# Altium schematic symbol library Gateway_Academic.SchLib: 77 symbols (part 1 of 2)
Pins are listed as number, name and electrical type; pins without a type are passive.

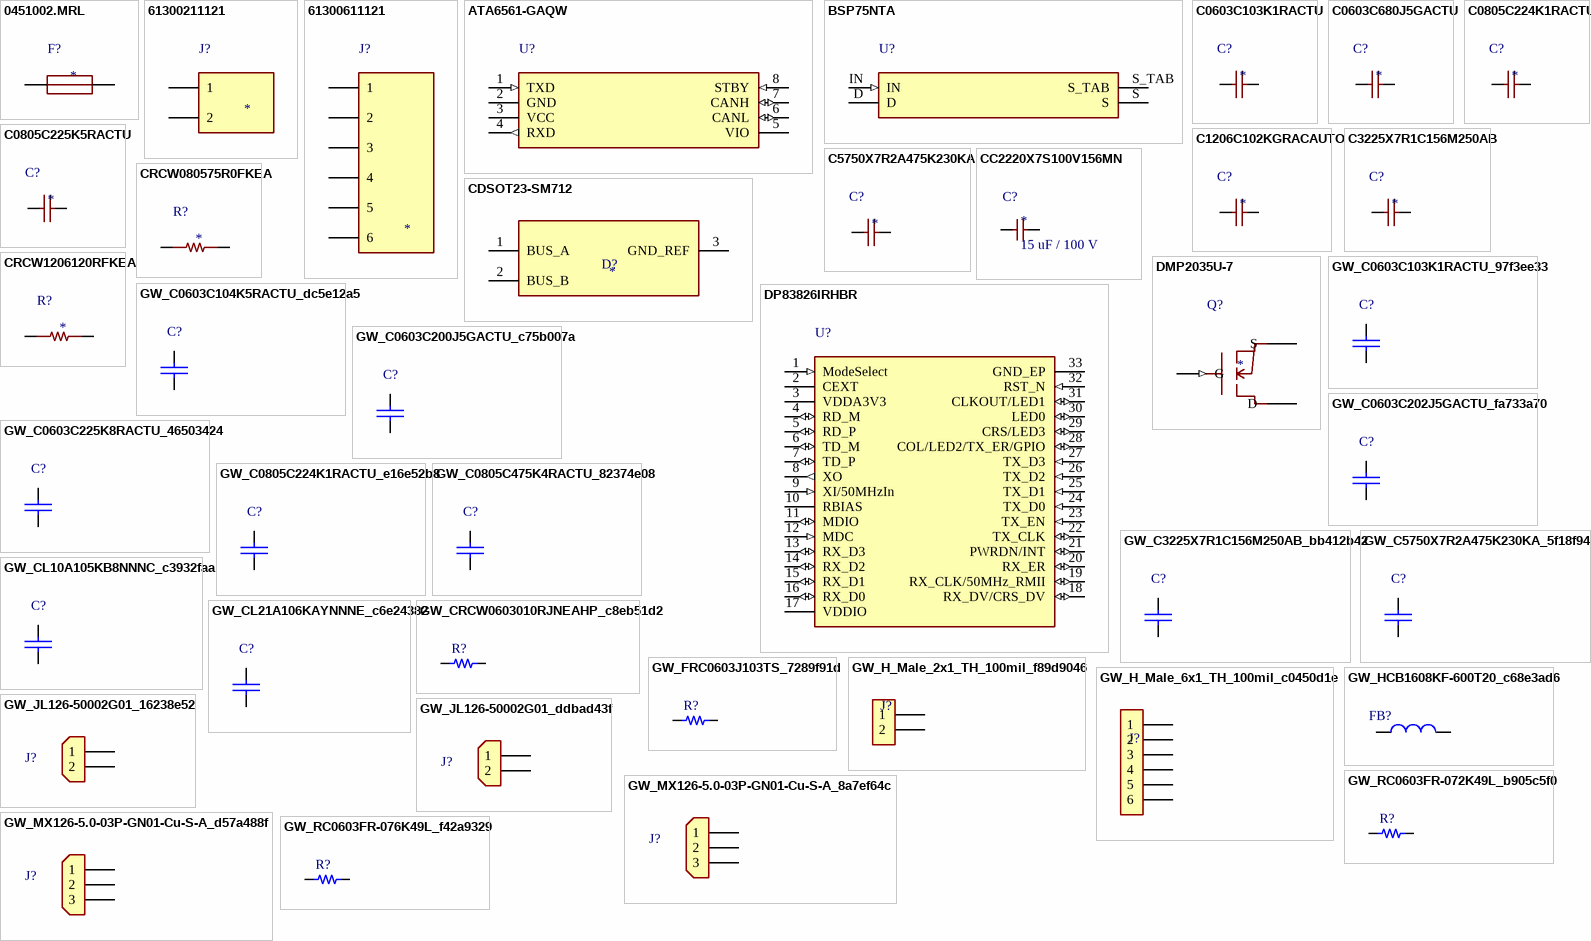
[diagram p0: symbols 0451002.MRL to GW_RC0603FR-076K49L_f42a9329]

## 0451002.MRL
designator F?
User-approved2A125VDC fuse; manufacturer dimensioned native footprint linked. Nonpolar terminals project1/2; supervised current-limited lab source. Not electrically tested.; Manufacturer: Littelfuse; Manufacturer Part Number: 0451002.MRL; CAD Status: CAD_VERIFIED; Electrical Approval: PROTOTYPE_APPROVED; Electrical Test: NOT_TESTED; Source: Official451/453 series Rev01-Dec-2025 pp1-4; electrical row002 and ordering; Datasheet: https://www.littelfuse.com/assetdocs/fuse-451-and-453-datasheet?assetguid=533cd5cc-956c-4243-867f-6ab5a62f6ba1; Limitations: User-approved2A125VDC fuse; manufacturer dimensioned native footprint linked. Nonpolar terminals project1/2; supervised current-limited lab source. Not electrically tested.; Design Approval: PROTOTYPE_APPROVED
footprint GW_0451_LITTELFUSE
pins: 1 END1, 2 END2

## 61300211121
designator J?
Wurth 61300211121 official datasheet p1 dimensions/recommended hole pattern;1.10mm holes2.54pitch;project orientationpin1lefttopview,sequence+X; Manufacturer: Wurth Elektronik; Value: 2x1 2.54mm straight male header; CAD Status: CAD_VERIFIED_GEOMETRY;NATIVE_PLACEMENT_PENDING; Electrical Status: DERIVED_PENDING_REVIEW; Manufacturer Part Number: 61300211121; Source: Wurth 61300211121 official datasheet p1 dimensions/recommended hole pattern;1.10mm holes2.54pitch; Datasheet URL: https://www.we-online.com/components/products/datasheet/61300211121.pdf
footprint GW_WRPHD_2X1_254_WURTH
pins: 1, 2

## 61300611121
designator J?
Wurth 61300611121 official datasheet p1 dimensions/recommended hole pattern;1.10mm holes2.54pitch;project orientationpin1lefttopview,sequence+X; Manufacturer: Wurth Elektronik; Value: 6x1 2.54mm straight male header; CAD Status: CAD_VERIFIED_GEOMETRY;NATIVE_PLACEMENT_PENDING; Electrical Status: DERIVED_PENDING_REVIEW; Manufacturer Part Number: 61300611121; Source: Wurth 61300611121 official datasheet p1 dimensions/recommended hole pattern;1.10mm holes2.54pitch; Datasheet URL: https://www.we-online.com/components/products/datasheet/61300611121.pdf
footprint GW_WRPHD_6X1_254_WURTH
pins: 1, 2, 3, 4, 5, 6

## ATA6561-GAQW
designator U?  (value not drawn)
ATA6561-GAQW; CAD_VERIFIED_GEOMETRY; ExactselectedSOIC8,notVDFN,verifiedagainstMicrochiprecommendedlands. NoEP9. SharedTIfoot hasidenticalpadgeometry;smallroundedcornersareprototypeprocesschoice. NativeECO/assemblyreviewpending.; CAD_Status: CAD_VERIFIED_GEOMETRY;NATIVE_ECO_PENDING; Electrical_Status: PROVISIONAL; CAD_Source: Microchip DS20005991B p19 C04-2057-OARevE recommendedlands:C5.40,E1.27,X.60,Y1.55; Manufacturer: Microchip; Manufacturer Part Number: ATA6561-GAQW; Value: ATA6561-GAQW; CAD_Limitations: ExactselectedSOIC8,notVDFN,verifiedagainstMicrochiprecommendedlands. NoEP9. SharedTIfoot hasidenticalpadgeometry;smallroundedcornersareprototypeprocesschoice. NativeECO/assemblyreviewpending.
footprint GW_SOIC8_1P27_5P4
pins: 1 TXD (in), 2 GND (power), 3 VCC (power), 4 RXD (out), 5 VIO (power), 6 CANL (io), 7 CANH (io), 8 STBY (in)

## BSP75NTA
designator U?  (value not drawn)
BSP75NTA smart low-side switch; physical terminal positions and Diodes land pattern verified; IN,D,S,S_TAB identifiers; driver VOH acceptance remains pending.; Manufacturer: Diodes Incorporated; CAD_Status: CAD_BLOCKED; Electrical_Status: PROVISIONAL; CAD_Source: Diodes DS33016 Rev7-2 pp1,8; terminal numbering absent; CAD_Limitations: CAD_BLOCKED: terminal identifiers are role names, not manufacturer numbers. Tab=Source, isolated from Drain. Need exact numbered Type DN drawing/model before any placement or footprint binding.; CAD Status: CAD_VERIFIED; Limitations: Physical mapping verified from Diodes top view: with tab above, left IN, middle D, right S; tab S_TAB=Source. No manufacturer numeric pin IDs asserted. Loaded driver VOH and startup OFF not yet verified.; Electrical Approval: ELECTRICAL_BLOCKED_DRIVER_VOLTAGE_PENDING; Physical Mapping: IN left lower;D center lower;S right lower;S_TAB upper tab;Top View; Manufacturer Part Number: BSP75NTA; Value: BSP75NTA; Source: Diodes DS33016 Rev7-2 Jan2024 p1 Top View Pin Out, p8 Suggested Pad Layout; functional pad identifiers preserve original symbol pins; Datasheet: sources/bsp75n_closure/BSP75N.pdf
footprint GW_BSP75N_SOT223_DN_DIODES
pins: D, IN (in), S (power), S_TAB (power)

## C0603C103K1RACTU
designator C?
10nF10%100VX7R; Exact KEMET DI_CIN spec; KEMET C1027Table3 nominal1608 mechanically compatible reference lands; Manufacturer Part Number: C0603C103K1RACTU; Design Approval: PROPOSED_APPLICATION_VALUE; CAD Status: CAD_VERIFIED; Electrical Test: NOT_TESTED; Manufacturer: KEMET; Value: 10nF10%100VX7R; Source: Exact KEMET DI_CIN spec; KEMET C1027Table3 nominal1608 mechanically compatible reference lands; Datasheet: sources/DI_CIN_C0603C103K1RACTU.pdf
footprint GW_0603_KEMET_NOMINAL
pins: 1, 2

## C0603C680J5GACTU
designator C?
KEMET C0603C680J5GACTU exact manufacturer spec; shared1608 body; KEMET C1027Table3p12 nominal1608 lands; 68pF5%50VC0G; DNP in frozen BOM; dvdt open. Fit only if startup review/measurement requires slower ramp.; Design Approval: PROTOTYPE_APPROVED; Electrical Test: NOT_TESTED; CAD Status: CAD_VERIFIED; Manufacturer: KEMET; Manufacturer Part Number: C0603C680J5GACTU; Value: 68pF5%50VC0G; Source: KEMET C0603C680J5GACTU exact manufacturer spec; shared1608 body; KEMET C1027Table3p12 nominal1608 lands; Limitations: DNP in frozen BOM; dvdt open. Fit only if startup review/measurement requires slower ramp.
footprint GW_0603_KEMET_NOMINAL
pins: 1, 2

## C0805C224K1RACTU
designator C?
KEMET exact0805 spec body/termination dimensions; KEMET C1027 p12 Table3 nominal2012 reflow lands transferred to mechanically matching commercial0805; 220nF10%100VX7R;; Manufacturer Part Number: C0805C224K1RACTU; Design Approval: PROTOTYPE_APPROVED; Electrical Test: NOT_TESTED; CAD Status: CAD_VERIFIED; Limitations: None; Manufacturer: KEMET; Value: 220nF10%100VX7R; Source: KEMET exact0805 spec body/termination dimensions; KEMET C1027 p12 Table3 nominal2012 reflow lands transferred to mechanically matching commercial0805
footprint GW_0805_KEMET_NOMINAL
pins: 1, 2

## C0805C225K5RACTU
designator C?
KEMET exact0805 spec body/termination dimensions; KEMET C1027 p12 Table3 nominal2012 reflow lands transferred to mechanically matching commercial0805; 2.2uF10%50VX7R; VCC5V local bypass;2.2uF prototype selection replaces known insufficient1uF part. Assumed>=60% bias retention; verify stableVCC at bring-up.; Manufacturer Part Number: C0805C225K5RACTU; Design Approval: PROTOTYPE_APPROVED; Electrical Test: NOT_TESTED; CAD Status: CAD_VERIFIED; Manufacturer: KEMET; Value: 2.2uF10%50VX7R; Source: KEMET exact0805 spec body/termination dimensions; KEMET C1027 p12 Table3 nominal2012 reflow lands transferred to mechanically matching commercial0805; Limitations: VCC5V local bypass;2.2uF prototype selection replaces known insufficient1uF part. Assumed>=60% bias retention; verify stableVCC at bring-up.
footprint GW_0805_KEMET_NOMINAL
pins: 1, 2

## C1206C102KGRACAUTO
designator C?
KEMET1nF10%2kVDCX7R1206; Ethernet chassis AC return; no safety-Y or surge claim; Manufacturer: KEMET; Manufacturer Part Number: C1206C102KGRACAUTO; Value: 1 nF; Tolerance: 10%; Voltage Rating: 2000 VDC; Dielectric: X7R; CAD Status: CAD_VERIFIED; Electrical Approval: PROVISIONAL_APPLICATION; not safety-Y certified; Electrical Test: NOT_TESTED; Assembly: JLC Extended observed2026-11-07; quantity unknown; no stock reservation; Package: 1206 /3216; Datasheet: sources/ethernet_1nf/C600002.pdf; Source: KEMET C1076_X7R_HV_AUTO_SMD9/10/2019 pp1-2 ordering/rating,p4 body,p10 Table3 densityB1206; C600002 exact catalog identity; LCSC Part Number: C600002; Terminal Mapping: Nonpolar, project1-left/2-right; symbol1->pad1,2->pad2
footprint GW_C1206_KEMET_C1076_DENSITY_B
pins: 1, 2

## C3225X7R1C156M250AB
designator C?
TDK official C3225X7R1C156M250AB product page lands PA2.0-2.4 PB1.0-1.2 PC1.9-2.5; TI table10-1 rated45uF example; 15uF20%16VX7R; 3 per buck:45uF rated per TI1MHz example. Prototype load-step/ripple confirmation pending; do not connect to24V input.; Design Approval: PROTOTYPE_APPROVED; Electrical Test: NOT_TESTED; CAD Status: CAD_VERIFIED; Manufacturer: TDK; Manufacturer Part Number: C3225X7R1C156M250AB; Value: 15uF20%16VX7R; Source: TDK official C3225X7R1C156M250AB product page lands PA2.0-2.4 PB1.0-1.2 PC1.9-2.5; TI table10-1 rated45uF example; Limitations: 3 per buck:45uF rated per TI1MHz example. Prototype load-step/ripple confirmation pending; do not connect to24V input.
footprint GW_C3225_TDK_REFLOW
pins: 1, 2

## C5750X7R2A475K230KA
designator C?
TDK C5750X7R2A475K230KA exact2014web-derived PDF p1 lands,p2 DCbias; current official product page same PA/PB/PC; 4.7uF10%100VX7R;; Design Approval: PROTOTYPE_APPROVED; Electrical Test: NOT_TESTED; CAD Status: CAD_VERIFIED; Limitations: None; Manufacturer: TDK; Manufacturer Part Number: C5750X7R2A475K230KA; Value: 4.7uF10%100VX7R; Source: TDK C5750X7R2A475K230KA exact2014web-derived PDF p1 lands,p2 DCbias; current official product page same PA/PB/PC
footprint GW_C5750_TDK_REFLOW
pins: 1, 2

## CC2220X7S100V156MN
designator C?  value 15 uF / 100 V
TORCH15uF100V2220 MLCC; C54157533 catalog identity; family PDF does not explicitly cover X7S. Footprint pending exact manufacturer lands.; Manufacturer: TORCH; Manufacturer Part Number: CC2220X7S100V156MN; Tolerance: 20% (M ordering code); Voltage Rating: 100 V; Dielectric: X7S per MPN; not explicitly covered in supplied family PDF; CAD Status: SYMBOL_READY;FOOTPRINT_MISSING; Electrical Status: PROVISIONAL;NOT_SELECTED_AS_BOM_REPLACEMENT; Limitations: Family PDF p1 codes156/M/100V and2220body; X7S exact specifications, DCbias/effective capacitance and manufacturer lands unverified. No application approval.; Package: 2220; LCSC: C54157533; Datasheet: sources/cap15uf100v/C54157533.pdf; Catalog URL: https://www.lcsc.com/product-detail/C54157533.html
pins: 1, 2

## CDSOT23-SM712
designator D?
Bourns CDSOT23-SM712 saved2026-11-07 pp1-2 pin diagram and Recommended Footprint; CAD mapping supported; no transferred 1kV surge rating for THVD1420. Populate only after protection qualification.; CAD Status: CAD_CANDIDATE; Manufacturer: Bourns; Manufacturer Part Number: CDSOT23-SM712; Source: Bourns CDSOT23-SM712 saved2026-11-07 pp1-2 pin diagram and Recommended Footprint; Limitations: CAD mapping supported; no transferred 1kV surge rating for THVD1420. Populate only after protection qualification.
footprint GW_SM712_BOURNS
pins: 1 BUS_A, 2 BUS_B, 3 GND_REF

## CRCW080575R0FKEA
designator R?
75Ohm1%0.125W0805 Vishay D/CRCW e3; Ethernet cable termination; not C-suffix commodity variant; Manufacturer Part Number: CRCW080575R0FKEA; Value: 75 Ohm; Tolerance: 1%; Power Rating: 0.125 W at70C; derating applies; TCR: 100 ppm/K; Local Datasheet: sources/ethernet_75ohm/C844859.pdf; CAD Status: CAD_VERIFIED; Design Approval: RETAINED_ORIGINAL_SELECTION; Electrical Test: NOT_TESTED; Assembly: JLC Extended observed; quantity unknown; verify before ordering; Manufacturer: Vishay; Package: 0805 /2012; Datasheet: https://www.vishay.com/docs/20035/dcrcwe3.pdf; Source: Vishay20035 Rev18-Jun-2018 p3 ordering, p9 body/reflow lands; JLC C844859 exact identity observed2026-11-07; LCSC Part Number: C844859; Terminal Mapping: Nonpolar resistor: project pin1=left pad1,pin2=right pad2
footprint GW_CRCW0805_VISHAY_20035_REFLOW
pins: 1, 2

## CRCW1206120RFKEA
designator R?
Vishay D/CRCW e3 family20035;120ohm1%0.25W1206; optional bus-end termination,open-default jumper.; Manufacturer Part Number: CRCW1206120RFKEA; Value: 120 Ohm; CAD Status: CAD_VERIFIED_GEOMETRY;NATIVE_PLACEMENT_PENDING; Electrical Status: DERIVED_PENDING_REVIEW;END_NODE_ONLY;STOCK_UNVERIFIED; Tolerance: 1%; Power Rating: 0.25W at70C; Manufacturer: Vishay; Source: Vishay20035 family ordering/power;18Jun2018p9 REFLOW1206 lands; Package: 1206; Datasheet: sources/ethernet_75ohm/C844859.pdf
footprint GW_CRCW1206_VISHAY_20035_REFLOW
pins: 1, 2

## DMP2035U-7
designator Q?
Diodes DS31830 Rev11-2 June2025 p1 top view/order,p2 electrical,p6 suggested lands; conventional PMOS symbol; used in5V BSP input driver,NOT24V load path; Manufacturer: Diodes Incorporated; Manufacturer Part Number: DMP2035U-7; Value: PMOS20V;VGS±10V; CAD Status: CAD_VERIFIED_GEOMETRY;NATIVE_PLACEMENT_PENDING; Electrical Status: DERIVED_PENDING_REVIEW; Source: Diodes DS31830 Rev11-2 June2025 p1 top view/order,p2 electrical,p6 suggested lands; Datasheet: sources/autonomous_closure/DMP2035U.pdf; Terminal Mapping: Top view tab/lead above C/D; lower-left B/G; lower-right E/S; manufacturer functional IDs, no guessed numbers
footprint GW_DMP2035U_GSD_DIODES
pins: D, G (in), S

## DP83826IRHBR
designator U?  (value not drawn)
DP83826IRHBR; CAD_VERIFIED_GEOMETRY; Manufacturer lands/pin33map verified;R0.05 usesAltium40% ofhalf0.25mm. Fourrectangularpastewindows approximate80percent,laser-corner/process review required. NativeinstanceECO notverified;optionalvias needplugging/tenting/fill treatment.; Manufacturer: Texas Instruments; CAD_Status: CAD_VERIFIED_GEOMETRY;NATIVE_ECO_PENDING; Electrical_Status: PROVISIONAL; CAD_Source: TI SNLS647I RHB0032M4223725/A PDF112-113;32lead.6x.25,pitch.5,row4.8,EP33=2.1square,4x.94paste windows; Manufacturer Part Number: DP83826IRHBR; Value: DP83826IRHBR; CAD_Limitations: Manufacturer lands/pin33map verified;R0.05 usesAltium40% ofhalf0.25mm. Fourrectangularpastewindows approximate80percent,laser-corner/process review required. NativeinstanceECO notverified;optionalvias needplugging/tenting/fill treatment.
footprint GW_RHB0032M_TI
pins: 1 ModeSelect (in), 2 CEXT, 3 VDDA3V3 (power), 4 RD_M (io), 5 RD_P (io), 6 TD_M (io), 7 TD_P (io), 8 XO (out), 9 XI/50MHzIn (in), 10 RBIAS, 11 MDIO (io), 12 MDC (in), 13 RX_D3 (io), 14 RX_D2 (io), 15 RX_D1 (io), 16 RX_D0 (io), 17 VDDIO (power), 18 RX_DV/CRS_DV (io), 19 RX_CLK/50MHz_RMII (io), 20 RX_ER (io), 21 PWRDN/INT (io), 22 TX_CLK (io), 23 TX_EN (in), 24 TX_D0 (in), 25 TX_D1 (in), 26 TX_D2 (in), 27 TX_D3 (in), 28 COL/LED2/TX_ER/GPIO (io), 29 CRS/LED3 (io), 30 LED0 (io), 31 CLKOUT/LED1 (io), 32 RST_N (in), 33 GND_EP (power)

## GW_C0603C103K1RACTU_97f3ee33
designator C?, comment 10 nF  (value not drawn)
C0603C103K1RACTU; 10 nF; 100 V; X7R; -55..125 C; CAD_CANDIDATE; Manufacturer: KEMET; Tolerance: 10%; CAD_Status: CAD_VERIFIED_SOURCE_LAND;NATIVE_INSTANCE_ECO_PENDING; Electrical_Status: PROVISIONAL; CAD_Source: Professor_shared.SchLib glyph Cap_0.1uF_0603_50V; CAD_Limitations: Same-manufacturer series mounting geometry verified; prototype mask/paste choices recorded. Electrical application limits unchanged. Native instance links/ECO pending.; Electrical_Notes: Ficha KEMET local DI_CIN p1; no confundir con externo CL10B103KA8WPNC 25 V. Modelo candidato existente; sin cotejo visual de pads/pines en Altium.; Manufacturer Part Number: C0603C103K1RACTU; Value: 10 nF; Rating: 100 V; X7R; -55..125 C; Power Rating: N/A; Package: 0603
footprint GW_0603_KEMET_NOMINAL
pins: 1, 2

## GW_C0603C104K5RACTU_dc5e12a5
designator C?, comment 100 nF  (value not drawn)
C0603C104K5RACTU; 100 nF; 50 V; X7R; -55..125 C; CAD_CANDIDATE; Manufacturer: KEMET; Tolerance: 10%; CAD_Status: CAD_VERIFIED_SOURCE_LAND;NATIVE_INSTANCE_ECO_PENDING; Electrical_Status: PROVISIONAL; CAD_Source: Professor_shared.SchLib glyph Cap_0.1uF_0603_50V; CAD_Limitations: Same-manufacturer series mounting geometry verified; prototype mask/paste choices recorded. Electrical application limits unchanged. Native instance links/ECO pending.; Electrical_Notes: Ficha KEMET local p1. Adaptar parametros; no usar el Y5V 0603F104Z500CT como equivalente. Modelo candidato existente; sin cotejo visual de pads/pines en Altium.; Manufacturer Part Number: C0603C104K5RACTU; Value: 100 nF; Rating: 50 V; X7R; -55..125 C; Power Rating: N/A; Package: 0603
footprint GW_0603_KEMET_NOMINAL
pins: 1, 2

## GW_C0603C200J5GACTU_c75b007a
designator C?, comment 20 pF  (value not drawn)
C0603C200J5GACTU; 20 pF; 50 V; C0G; CAD_CANDIDATE; Manufacturer: KEMET; Tolerance: 5%; CAD_Status: CAD_VERIFIED_SOURCE_LAND;NATIVE_INSTANCE_ECO_PENDING; Electrical_Status: PROVISIONAL; CAD_Source: Professor_shared.SchLib glyph Cap_0.1uF_0603_50V; CAD_Limitations: Same-manufacturer series mounting geometry verified; prototype mask/paste choices recorded. Electrical application limits unchanged. Native instance links/ECO pending.; Electrical_Notes: Valor guia fabricante; validar lazo. Con RFBT100k no obligatorio universal; reservar DNP hasta respuesta/Bode. Modelo candidato existente; sin cotejo visual de pads/pines en Altium.; Manufacturer Part Number: C0603C200J5GACTU; Value: 20 pF; Rating: 50 V; C0G; Power Rating: N/A; Package: 0603
footprint GW_0603_KEMET_NOMINAL
pins: 1, 2

## GW_C0603C202J5GACTU_fa733a70
designator C?, comment 2 nF  (value not drawn)
C0603C202J5GACTU; 2 nF; 50 V; C0G; CAD_CANDIDATE; Manufacturer: KEMET; Tolerance: 5% seleccion; CAD_Status: CAD_VERIFIED_SOURCE_LAND;NATIVE_INSTANCE_ECO_PENDING; Electrical_Status: PROVISIONAL; CAD_Source: Professor_shared.SchLib glyph Cap_0.1uF_0603_50V; CAD_Limitations: Same-manufacturer series mounting geometry verified; prototype mask/paste choices recorded. Electrical application limits unchanged. Native instance links/ECO pending.; Electrical_Notes: Conflicto EVM C57=100 nF; prevalece requisito actual 2 nF, no copiar C57. Modelo candidato existente; sin cotejo visual de pads/pines en Altium.; Manufacturer Part Number: C0603C202J5GACTU; Value: 2 nF; Rating: 50 V; C0G; Power Rating: N/A; Package: 0603
footprint GW_0603_KEMET_NOMINAL
pins: 1, 2

## GW_C0603C225K8RACTU_46503424
designator C?, comment 2.2 uF  (value not drawn)
C0603C225K8RACTU; 2.2 uF; 10 V; X7R; ESR <100 mOhm; CAD_CANDIDATE; Manufacturer: KEMET; Tolerance: 10% candidato; ST permite 20%; CAD_Status: CAD_VERIFIED_SOURCE_LAND;NATIVE_INSTANCE_ECO_PENDING; Electrical_Status: PROVISIONAL; CAD_Source: Professor_shared.SchLib glyph Cap_0.1uF_0603_50V; CAD_Limitations: Same-manufacturer series mounting geometry verified; prototype mask/paste choices recorded. Electrical application limits unchanged. Native instance links/ECO pending.; Electrical_Notes: Falta ESR y capacitancia bajo VCORE/temperatura/envejecimiento. No conectar 3.3 V ni carga externa a VCAP. Modelo candidato existente; sin cotejo visual de pads/pines en Altium.; Manufacturer Part Number: C0603C225K8RACTU; Value: 2.2 uF; Rating: 10 V; X7R; ESR <100 mOhm; Power Rating: N/A; Package: 0603
footprint GW_0603_KEMET_NOMINAL
pins: 1, 2

## GW_C0805C224K1RACTU_e16e52b8
designator C?, comment 220 nF  (value not drawn)
C0805C224K1RACTU; 220 nF; 100 V; X7R; CAD_CANDIDATE; Manufacturer: KEMET; Tolerance: 10%; CAD_Status: CAD_VERIFIED_SOURCE_LAND;NATIVE_INSTANCE_ECO_PENDING; Electrical_Status: PROVISIONAL; CAD_Source: Professor_shared.SchLib glyph Cap_10uF_0805_25V_; CAD_Limitations: Same-manufacturer series mounting geometry verified; prototype mask/paste choices recorded. Electrical application limits unchanged. Native instance links/ECO pending.; Electrical_Notes: Uno por par VIN-PGND en lados opuestos; falta Ceff y cotejo dimensiones pads. Modelo candidato existente; sin cotejo visual de pads/pines en Altium.; Manufacturer Part Number: C0805C224K1RACTU; Value: 220 nF; Rating: 100 V; X7R; Power Rating: N/A; Package: 0805
footprint GW_0805_KEMET_NOMINAL
pins: 1, 2

## GW_C0805C475K4RACTU_82374e08
designator C?, comment 4.7 uF  (value not drawn)
C0805C475K4RACTU; 4.7 uF; 16 V; X7R; CAD_CANDIDATE; Manufacturer: KEMET; Tolerance: 10%; CAD_Status: CAD_VERIFIED_SOURCE_LAND;NATIVE_INSTANCE_ECO_PENDING; Electrical_Status: PROVISIONAL; CAD_Source: Professor_shared.SchLib glyph Cap_10uF_0805_25V_; CAD_Limitations: Same-manufacturer series mounting geometry verified; prototype mask/paste choices recorded. Electrical application limits unchanged. Native instance links/ECO pending.; Electrical_Notes: Ceff a 3.3 V pendiente; no sustituir por 10 uF solo por disponibilidad. Modelo candidato existente; sin cotejo visual de pads/pines en Altium.; Manufacturer Part Number: C0805C475K4RACTU; Value: 4.7 uF; Rating: 16 V; X7R; Power Rating: N/A; Package: 0805
footprint GW_0805_KEMET_NOMINAL
pins: 1, 2

## GW_C3225X7R1C156M250AB_bb412b42
designator C?, comment 15 uF por unidad; 45 uF nominal banco  (value not drawn)
C3225X7R1C156M250AB; 15 uF por unidad; 45 uF nominal banco; 16 V; X7R; CAD_CANDIDATE; Manufacturer: TDK; Tolerance: 20%; CAD_Status: CAD_VERIFIED_SOURCE_LAND;NATIVE_INSTANCE_ECO_PENDING; Electrical_Status: PROVISIONAL; CAD_Source: Professor_shared.SchLib glyph Cap_0.1uF_0603_50V; CAD_Limitations: Same-manufacturer series mounting geometry verified; prototype mask/paste choices recorded. Electrical application limits unchanged. Native instance links/ECO pending.; Electrical_Notes: Ceff a 3.3 V, ESR, escalon de carga y Bode pendientes. No atribuir 45 uF efectivos ni ESR3.04mOhm del modelo AR. Sin footprint1210 docente.; Manufacturer Part Number: C3225X7R1C156M250AB; Value: 15 uF por unidad; 45 uF nominal banco; Rating: 16 V; X7R; Power Rating: N/A; Package: 1210
footprint GW_C3225_TDK_REFLOW
pins: 1, 2

## GW_C5750X7R2A475K230KA_5f18f946
designator C?, comment 4.7 uF por unidad; Ceff total >=4.7 uF objetivo conservador  (value not drawn)
C5750X7R2A475K230KA; 4.7 uF por unidad; Ceff total >=4.7 uF objetivo conservador; 100 V; X7R; CAD_CANDIDATE; Manufacturer: TDK; Tolerance: 10%; CAD_Status: CAD_VERIFIED_SOURCE_LAND;NATIVE_INSTANCE_ECO_PENDING; Electrical_Status: PROVISIONAL; CAD_Source: Professor_shared.SchLib glyph Cap_0.1uF_0603_50V; CAD_Limitations: Same-manufacturer series mounting geometry verified; prototype mask/paste choices recorded. Electrical application limits unchanged. Native instance links/ECO pending.; Electrical_Notes: No fijar cantidad hasta curva bias a30 V+tolerancia+temperatura. 4.7 nominal no garantiza 4.7 efectivo. Carga RMS objetivo >= 0.35 A banco; 2220 no presente profesor.; Manufacturer Part Number: C5750X7R2A475K230KA; Value: 4.7 uF por unidad; Ceff total >=4.7 uF objetivo conservador; Rating: 100 V; X7R; Power Rating: N/A; Package: 2220
footprint GW_C5750_TDK_REFLOW
pins: 1, 2

## GW_CL10A105KB8NNNC_c3932faa
designator C?, comment 1 uF  (value not drawn)
CL10A105KB8NNNC; 1 uF; 50 V; X5R; -55..85 C; CAD_CANDIDATE; Manufacturer: Samsung Electro-Mechanics; Tolerance: 10%; CAD_Status: CAD_VERIFIED_SOURCE_LAND;NATIVE_INSTANCE_ECO_PENDING; Electrical_Status: PROVISIONAL; CAD_Source: Professor_shared.SchLib glyph Cap_1uF_0603_50V; CAD_Limitations: Same-manufacturer series mounting geometry verified; prototype mask/paste choices recorded. Electrical application limits unchanged. Native instance links/ECO pending.; Electrical_Notes: Samsung ficha oficial; Ceff/ESR pendientes por aplicacion. Limite X5R 85 C: no homologado para ambiente superior. Modelo candidato existente; sin cotejo visual de pads/pines en Altium.; Manufacturer Part Number: CL10A105KB8NNNC; Value: 1 uF; Rating: 50 V; X5R; -55..85 C; Power Rating: N/A; Package: 0603
footprint GW_SAMSUNG_CL10_1608_REFLOW
pins: 1, 2

## GW_CL21A106KAYNNNE_c6e24382
designator C?, comment 10 uF  (value not drawn)
CL21A106KAYNNNE; 10 uF; 25 V; X5R; -55..85 C; CAD_CANDIDATE; Manufacturer: Samsung Electro-Mechanics; Tolerance: 10%; CAD_Status: CAD_VERIFIED_SOURCE_LAND;NATIVE_INSTANCE_ECO_PENDING; Electrical_Status: PROVISIONAL; CAD_Source: Professor_shared.SchLib glyph Cap_10uF_0805_25V_; CAD_Limitations: Same-manufacturer series mounting geometry verified; prototype mask/paste choices recorded. Electrical application limits unchanged. Native instance links/ECO pending.; Electrical_Notes: Ceff a 3.3 V y temperatura pendientes. No usar para entrada 30 V. Modelo candidato existente; sin cotejo visual de pads/pines en Altium.; Manufacturer Part Number: CL21A106KAYNNNE; Value: 10 uF; Rating: 25 V; X5R; -55..85 C; Power Rating: N/A; Package: 0805
footprint GW_SAMSUNG_CL21_2012_REFLOW
pins: 1, 2

## GW_CRCW0603010RJNEAHP_c8eb51d2
designator R?, comment 10 Ohm  (value not drawn)
CRCW0603010RJNEAHP; 10 Ohm; Pulse-proof segun ficha exacta; CAD_CANDIDATE; Manufacturer: Vishay; Tolerance: 5%; Power Rating: Pulsos por verificar; Electrical_Status: PROVISIONAL; CAD_Source: Professor_shared.SchLib glyph Res_10k_0603_1/10W; CAD_Limitations: Glyph pins/types inspected; exact manufacturer land-pattern/mask/paste qualification pending.; Electrical_Notes: Referencia usa THVD1400 a5 V. No valida THVD1420/3.3V/12Mbps: verificar VOD tras20Ohm, residuales clamp, pulsos y timing. Modelo candidato existente; sin cotejo visual de pads/pines en Altium.; Manufacturer Part Number: CRCW0603010RJNEAHP; Value: 10 Ohm; Rating: Pulse-proof segun ficha exacta; Package: 0603; CAD_Status: CAD_CANDIDATE
footprint GW_CAND_0603_res
pins: 1, 2

## GW_FRC0603J103TS_7289f91d
designator R?, comment 10 kOhm  (value not drawn)
FRC0603J103TS; 10 kOhm; >= 3.3 V; tension de trabajo por verificar; CAD_CANDIDATE; Manufacturer: FOJAN; Tolerance: 5%; Power Rating: 0.1 W; Electrical_Status: PROVISIONAL; CAD_Source: Professor_shared.SchLib glyph Res_10k_0603_1/10W; CAD_Limitations: Glyph pins/types inspected; exact manufacturer land-pattern/mask/paste qualification pending.; Electrical_Notes: Ratings transcritos del CAD; falta ficha FOJAN. Alternativa RC0603FR-0710KL con ficha oficial local, mismo footprint candidato. Modelo candidato existente; sin cotejo visual de pads/pines en Altium.; Manufacturer Part Number: FRC0603J103TS; Value: 10 kOhm; Rating: >= 3.3 V; tension de trabajo por verificar; Package: 0603; CAD_Status: CAD_CANDIDATE
footprint GW_CAND_0603_res
pins: 1, 2

## GW_H_Male_2x1_TH_100mil_f89d9046
designator J?, comment 2 posiciones  (value not drawn)
TBD; 2 posiciones; TBD; CAD_CANDIDATE; Manufacturer: UNVERIFIED; see original candidate BOM; Electrical_Status: PROVISIONAL; CAD_Source: Professor_shared.SchLib glyph H_Male_2x1_TH_100mil; CAD_Limitations: Glyph pins/types inspected; exact manufacturer land-pattern/mask/paste qualification pending.; Electrical_Notes: Pinout, MPN y orientacion pendientes. No alimentar VDD desde VTref; SWD PA13/PA14 y NRST. Modelo candidato existente; sin cotejo visual de pads/pines en Altium.; Manufacturer Part Number: TBD; Value: 2 posiciones; Tolerance: TBD; Rating: TBD; Power Rating: N/A; Package: TBD; CAD_Status: CAD_CANDIDATE
footprint GW_CAND_H_2x1_TH_100mil
pins: 1, 2

## GW_H_Male_6x1_TH_100mil_c0450d1e
designator J?, comment 6 posiciones  (value not drawn)
TBD; 6 posiciones; TBD; CAD_CANDIDATE; Manufacturer: UNVERIFIED; see original candidate BOM; Electrical_Status: PROVISIONAL; CAD_Source: Professor_shared.SchLib glyph H_Male_6x1_TH_100mil; CAD_Limitations: Glyph pins/types inspected; exact manufacturer land-pattern/mask/paste qualification pending.; Electrical_Notes: Pinout, MPN y orientacion pendientes. No alimentar VDD desde VTref; SWD PA13/PA14 y NRST. Modelo candidato existente; sin cotejo visual de pads/pines en Altium.; Manufacturer Part Number: TBD; Value: 6 posiciones; Tolerance: TBD; Rating: TBD; Power Rating: N/A; Package: TBD; CAD_Status: CAD_CANDIDATE
footprint GW_CAND_H_6x1_TH_100mil
pins: 1, 2, 3, 4, 5, 6

## GW_HCB1608KF-600T20_c68e3ad6
designator FB?, comment 60 Ohm @100 MHz candidato  (value not drawn)
HCB1608KF-600T20; 60 Ohm @100 MHz candidato; 2 A; DCR 100 mOhm segun CAD; CAD_CANDIDATE; Manufacturer: UNVERIFIED; see original candidate BOM; Tolerance: 25%; Electrical_Status: PROVISIONAL; CAD_Source: Professor_shared.SchLib glyph FB_60_0603_2A; CAD_Limitations: Glyph pins/types inspected; exact manufacturer land-pattern/mask/paste qualification pending.; Electrical_Notes: No exigir filtro adicional sin EMC; verificar curva de impedancia y resonancia con banco local si se monta. Modelo candidato existente; sin cotejo visual de pads/pines en Altium.; Manufacturer Part Number: HCB1608KF-600T20; Value: 60 Ohm @100 MHz candidato; Rating: 2 A; DCR 100 mOhm segun CAD; Power Rating: N/A; Package: 0603; CAD_Status: CAD_CANDIDATE
footprint GW_CAND_0603_fb
pins: 1, 2

## GW_JL126-50002G01_16238e52
designator J?, comment 2 polos + politica PE  (value not drawn)
JL126-50002G01; 2 polos + politica PE; >=30 V continuo mas transitorios; corriente TBD; CAD_CANDIDATE; Manufacturer: UNVERIFIED; see original candidate BOM; Electrical_Status: PROVISIONAL; CAD_Source: Professor_shared.SchLib glyph Con_2x1_TH_5mm; CAD_Limitations: Professor pads have Y offset 0.127mm: pin1 y=.254, pin2 y=.127. Exact JL126 drawing required; footprint retained as explicitly unverified candidate.; Electrical_Notes: Priorizar bornera docente tras MPN/tension/corriente/taladros, no jack ambiguo2.0/2.1 mm. Modelo candidato existente; sin cotejo visual de pads/pines en Altium.; Manufacturer Part Number: JL126-50002G01; Value: 2 polos + politica PE; Tolerance: TBD; Rating: >=30 V continuo mas transitorios; corriente TBD; Power Rating: N/A; Package: TBD; CAD_Status: CAD_CANDIDATE
footprint GW_CAND_CON_2x1_TH_5MM
pins: 1, 2

## GW_JL126-50002G01_ddbad43f
designator J?, comment 2 polos por canal  (value not drawn)
JL126-50002G01; 2 polos por canal; >=30 V y0.5 A/canal mas fallas; CAD_CANDIDATE; Manufacturer: UNVERIFIED; see original candidate BOM; Tolerance: TBD; Electrical_Status: PROVISIONAL; CAD_Source: Professor_shared.SchLib glyph Con_2x1_TH_5mm; CAD_Limitations: Professor pads have Y offset 0.127mm: pin1 y=.254, pin2 y=.127. Exact JL126 drawing required; footprint retained as explicitly unverified candidate.; Electrical_Notes: Priorizar bornera docente; source/tab a retorno campo; no terminal high-side. Retornos1A fuera GND analogico. Modelo candidato existente; sin cotejo visual de pads/pines en Altium.; Manufacturer Part Number: JL126-50002G01; Value: 2 polos por canal; Rating: >=30 V y0.5 A/canal mas fallas; Power Rating: N/A; Package: TBD; CAD_Status: CAD_CANDIDATE
footprint GW_CAND_CON_2x1_TH_5MM
pins: 1, 2

## GW_MX126-5.0-03P-GN01-Cu-S-A_8a7ef64c
designator J?, comment 3 polos si COM comun  (value not drawn)
MX126-5.0-03P-GN01-Cu-S-A; 3 polos si COM comun; TBD; CAD_CANDIDATE; Manufacturer: UNVERIFIED; see original candidate BOM; Electrical_Status: PROVISIONAL; CAD_Source: Professor_shared.SchLib glyph Con_3x1_TH_5mm; CAD_Limitations: Glyph pins/types inspected; exact manufacturer land-pattern/mask/paste qualification pending.; Electrical_Notes: Aislamiento de grupo o por canal pendiente. SUB1/SUB2 NC; FGND noGND1. EN definido aVCC1 si salidas permanentes, sin resistor necesario. Modelo candidato existente; sin cotejo visual de pads/pines en Altium.; Manufacturer Part Number: MX126-5.0-03P-GN01-Cu-S-A; Value: 3 polos si COM comun; Tolerance: TBD; Rating: TBD; Power Rating: N/A; Package: TBD; CAD_Status: CAD_CANDIDATE
footprint GW_CAND_CON_3x1_TH_5mm
pins: 1, 2, 3

## GW_MX126-5.0-03P-GN01-Cu-S-A_d57a488f
designator J?, comment 3 polos  (value not drawn)
MX126-5.0-03P-GN01-Cu-S-A; 3 polos; TBD; CAD_CANDIDATE; Manufacturer: UNVERIFIED; see original candidate BOM; Electrical_Status: PROVISIONAL; CAD_Source: Professor_shared.SchLib glyph Con_3x1_TH_5mm; CAD_Limitations: Glyph pins/types inspected; exact manufacturer land-pattern/mask/paste qualification pending.; Electrical_Notes: Ratings, corrientes de falla, pinout y referencia comun pendientes; no asumir aislamiento galvanico. Modelo candidato existente; sin cotejo visual de pads/pines en Altium.; Manufacturer Part Number: MX126-5.0-03P-GN01-Cu-S-A; Value: 3 polos; Tolerance: TBD; Rating: TBD; Power Rating: N/A; Package: TBD; CAD_Status: CAD_CANDIDATE
footprint GW_CAND_CON_3x1_TH_5mm
pins: 1, 2, 3

## GW_RC0603FR-072K49L_b905c5f0
designator R?, comment 2.49 kOhm  (value not drawn)
RC0603FR-072K49L; 2.49 kOhm; 75 V max; limite sqrt(P*R); CAD_CANDIDATE; Manufacturer: Yageo; Tolerance: 1%; Power Rating: 0.1 W @70 C; CAD_Status: CAD_VERIFIED_SOURCE_LAND;NATIVE_INSTANCE_ECO_PENDING; Electrical_Status: PROVISIONAL; CAD_Source: Professor_shared.SchLib glyph Res_10k_0603_1/10W; CAD_Limitations: Same-manufacturer series mounting geometry verified; prototype mask/paste choices recorded. Electrical application limits unchanged. Native instance links/ECO pending.; Electrical_Notes: Candidato ENHANCED/RMII leader: ModeSelect NC, strap1=1 default, strap8=1, strap5=0 default. Ver tabla del informe; sin LEDs de straps. Modelo candidato existente; sin cotejo visual de pads/pines en Altium.; Manufacturer Part Number: RC0603FR-072K49L; Value: 2.49 kOhm; Rating: 75 V max; limite sqrt(P*R); Package: 0603
footprint GW_RC0603_YAGEO_REFLOW
pins: 1, 2

## GW_RC0603FR-076K49L_f42a9329
designator R?, comment 6.49 kOhm  (value not drawn)
RC0603FR-076K49L; 6.49 kOhm; 75 V max; limite sqrt(P*R); CAD_CANDIDATE; Manufacturer: Yageo; Tolerance: 1%; Power Rating: 0.1 W @70 C; CAD_Status: CAD_VERIFIED_SOURCE_LAND;NATIVE_INSTANCE_ECO_PENDING; Electrical_Status: PROVISIONAL; CAD_Source: Professor_shared.SchLib glyph Res_10k_0603_1/10W; CAD_Limitations: Same-manufacturer series mounting geometry verified; prototype mask/paste choices recorded. Electrical application limits unchanged. Native instance links/ECO pending.; Electrical_Notes: P<3.3^2/6490=1.68 mW; actualizacion de valor/MPN sobre simbolo generico pendiente. Modelo candidato existente; sin cotejo visual de pads/pines en Altium.; Manufacturer Part Number: RC0603FR-076K49L; Value: 6.49 kOhm; Rating: 75 V max; limite sqrt(P*R); Package: 0603
footprint GW_RC0603_YAGEO_REFLOW
pins: 1, 2

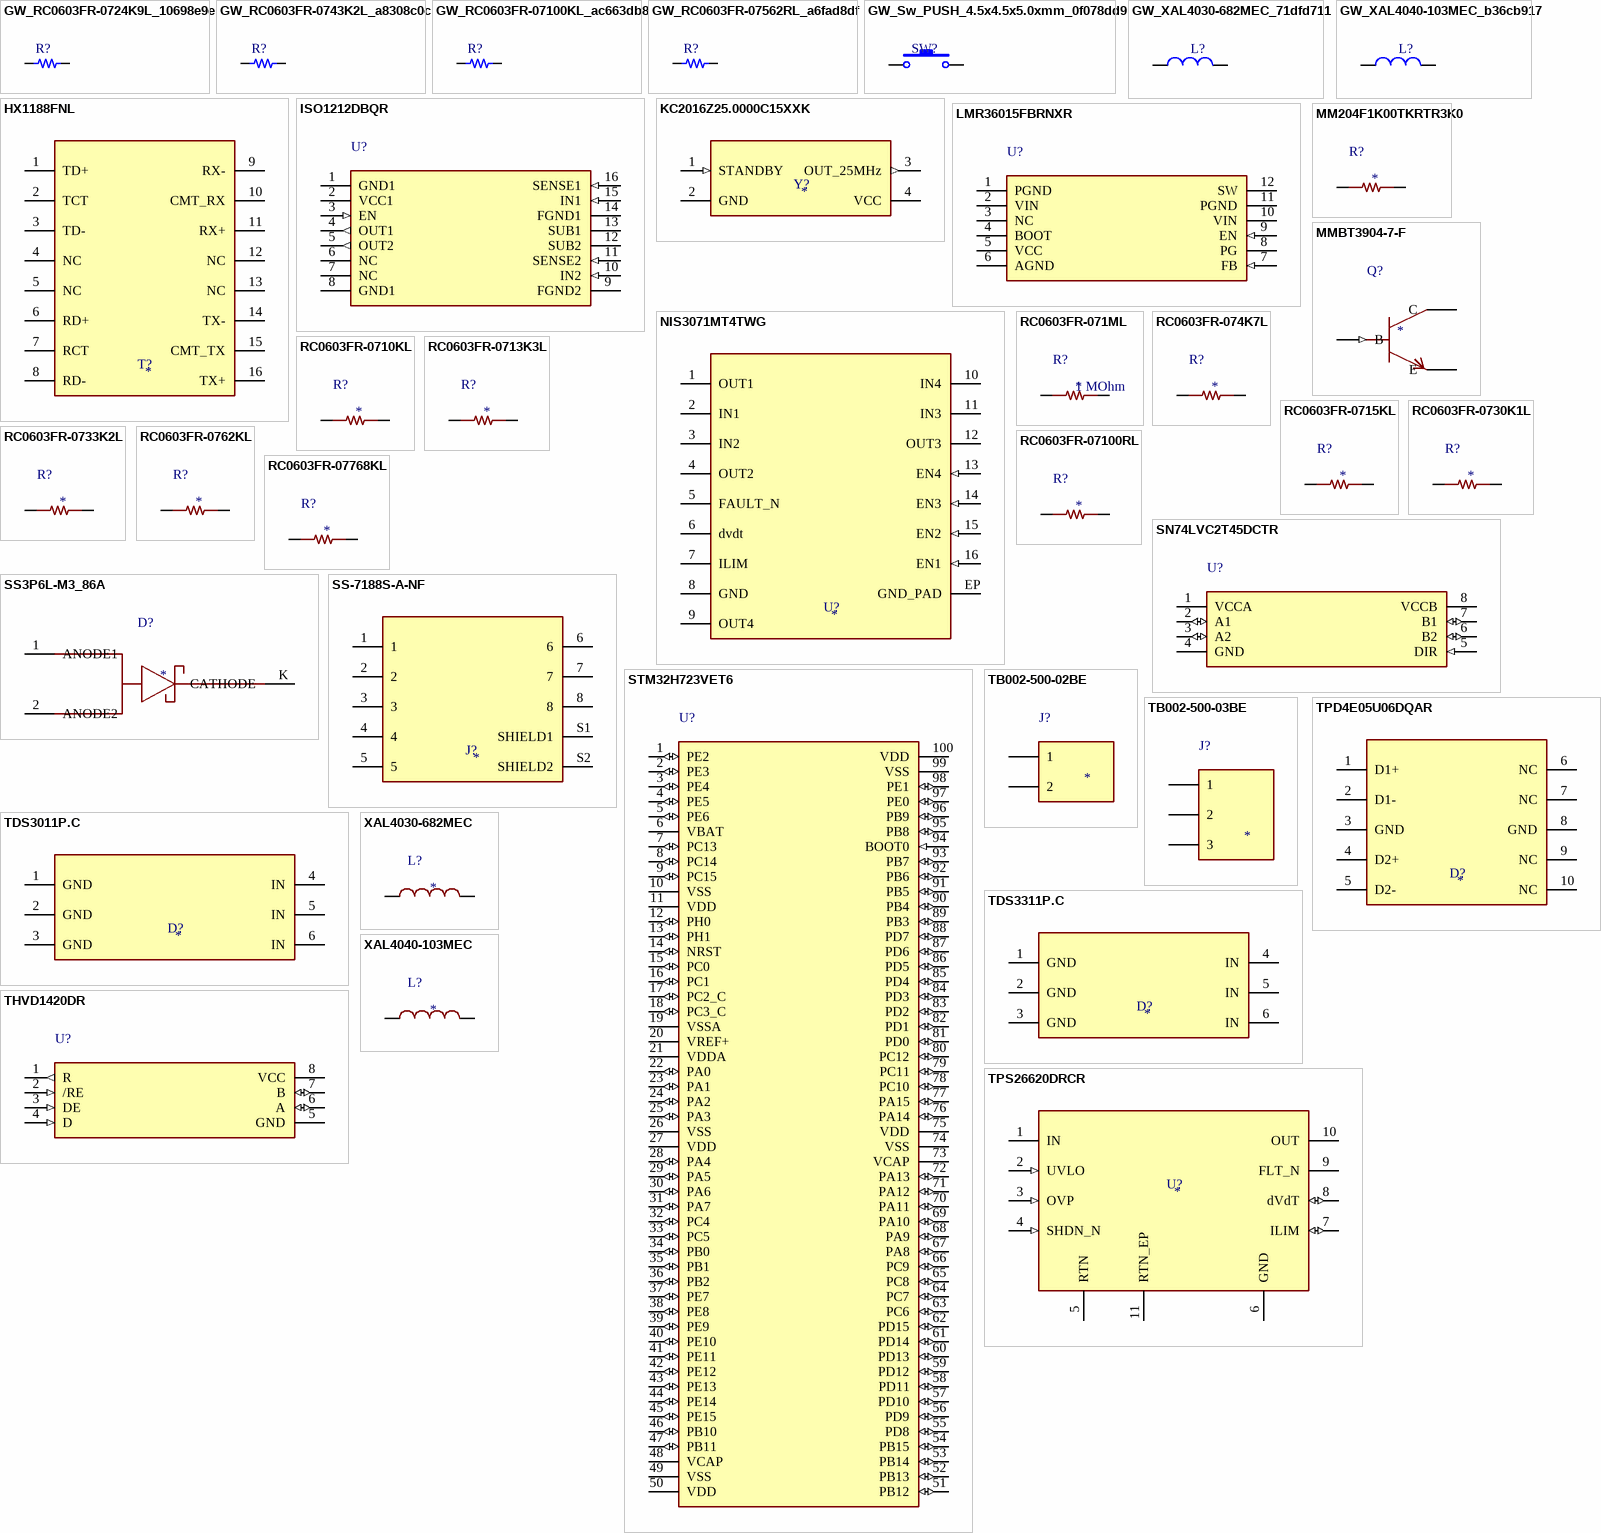
[diagram p1: symbols GW_RC0603FR-0724K9L_10698e9e to XAL4040-103MEC]

## GW_RC0603FR-0724K9L_10698e9e
designator R?, comment 24.9 kOhm  (value not drawn)
RC0603FR-0724K9L; 24.9 kOhm; 75 V max; limite sqrt(P*R); CAD_CANDIDATE; Manufacturer: Yageo; Tolerance: 1%; Power Rating: 0.1 W @70 C; CAD_Status: CAD_VERIFIED_SOURCE_LAND;NATIVE_INSTANCE_ECO_PENDING; Electrical_Status: PROVISIONAL; CAD_Source: Professor_shared.SchLib glyph Res_10k_0603_1/10W; CAD_Limitations: Same-manufacturer series mounting geometry verified; prototype mask/paste choices recorded. Electrical application limits unchanged. Native instance links/ECO pending.; Electrical_Notes: Vout nominal calculado 5.01606 V; ver esquinas de tolerancia. Cambiar parametros en copia docente. Modelo candidato existente; sin cotejo visual de pads/pines en Altium.; Manufacturer Part Number: RC0603FR-0724K9L; Value: 24.9 kOhm; Rating: 75 V max; limite sqrt(P*R); Package: 0603
footprint GW_RC0603_YAGEO_REFLOW
pins: 1, 2

## GW_RC0603FR-0743K2L_a8308c0c
designator R?, comment 43.2 kOhm  (value not drawn)
RC0603FR-0743K2L; 43.2 kOhm; 75 V max; limite sqrt(P*R); CAD_CANDIDATE; Manufacturer: Yageo; Tolerance: 1%; Power Rating: 0.1 W @70 C; CAD_Status: CAD_VERIFIED_SOURCE_LAND;NATIVE_INSTANCE_ECO_PENDING; Electrical_Status: PROVISIONAL; CAD_Source: Professor_shared.SchLib glyph Res_10k_0603_1/10W; CAD_Limitations: Same-manufacturer series mounting geometry verified; prototype mask/paste choices recorded. Electrical application limits unchanged. Native instance links/ECO pending.; Electrical_Notes: Vout nominal calculado 3.31481 V; ver esquinas de tolerancia. Cambiar parametros en copia docente. Modelo candidato existente; sin cotejo visual de pads/pines en Altium.; Manufacturer Part Number: RC0603FR-0743K2L; Value: 43.2 kOhm; Rating: 75 V max; limite sqrt(P*R); Package: 0603
footprint GW_RC0603_YAGEO_REFLOW
pins: 1, 2

## GW_RC0603FR-07100KL_ac663db8
designator R?, comment 100 kOhm  (value not drawn)
RC0603FR-07100KL; 100 kOhm; 75 V max; limite sqrt(P*R); CAD_CANDIDATE; Manufacturer: Yageo; Tolerance: 1%; Power Rating: 0.1 W @70 C; CAD_Status: CAD_VERIFIED_SOURCE_LAND;NATIVE_INSTANCE_ECO_PENDING; Electrical_Status: PROVISIONAL; CAD_Source: Professor_shared.SchLib glyph Res_10k_0603_1/10W; CAD_Limitations: Same-manufacturer series mounting geometry verified; prototype mask/paste choices recorded. Electrical application limits unchanged. Native instance links/ECO pending.; Electrical_Notes: Vout nominal calculado 3.31481 V; ver esquinas de tolerancia. Cambiar parametros en copia docente. Modelo candidato existente; sin cotejo visual de pads/pines en Altium.; Manufacturer Part Number: RC0603FR-07100KL; Value: 100 kOhm; Rating: 75 V max; limite sqrt(P*R); Package: 0603
footprint GW_RC0603_YAGEO_REFLOW
pins: 1, 2

## GW_RC0603FR-07562RL_a6fad8df
designator R?, comment 562 Ohm  (value not drawn)
RC0603FR-07562RL; 562 Ohm; 75 V max; limite sqrt(P*R); CAD_CANDIDATE; Manufacturer: Yageo; Tolerance: 1%; Power Rating: 0.1 W @70 C; CAD_Status: CAD_VERIFIED_SOURCE_LAND;NATIVE_INSTANCE_ECO_PENDING; Electrical_Status: PROVISIONAL; CAD_Source: Professor_shared.SchLib glyph Res_10k_0603_1/10W; CAD_Limitations: Same-manufacturer series mounting geometry verified; prototype mask/paste choices recorded. Electrical application limits unchanged. Native instance links/ECO pending.; Electrical_Notes: Ityp2.25mA; P conservadora a2.75mA=4.30mW. No es resistor de24V completos; corriente de campo separada deVCC1. Modelo candidato existente; sin cotejo visual de pads/pines en Altium.; Manufacturer Part Number: RC0603FR-07562RL; Value: 562 Ohm; Rating: 75 V max; limite sqrt(P*R); Package: 0603
footprint GW_RC0603_YAGEO_REFLOW
pins: 1, 2

## GW_Sw_PUSH_4.5x4.5x5.0xmm_0f078dd9
designator SW?, comment SPST-NO  (value not drawn)
TBD; SPST-NO; TBD; CAD_CANDIDATE; Manufacturer: UNVERIFIED; see original candidate BOM; CAD_Status: CAD_BLOCKED; Electrical_Status: PROVISIONAL; CAD_Source: Professor_shared.SchLib glyph Sw_PUSH_4.5x4.5x5.0xmm; CAD_Limitations: Footprint unfinished: paired pads 1/1 and 2/2 in professor source are rejected by official writer duplicate-designator validation. Exact switch MPN/terminal-pairing drawing and native copy verification required. No pad renumbering invented.; Electrical_Notes: Pinout, MPN y orientacion pendientes. No alimentar VDD desde VTref; SWD PA13/PA14 y NRST. Modelo candidato existente; sin cotejo visual de pads/pines en Altium.; Manufacturer Part Number: TBD; Value: SPST-NO; Tolerance: TBD; Rating: TBD; Power Rating: N/A; Package: TBD
pins: 1, 2

## GW_XAL4030-682MEC_71dfd711
designator L?, comment 6.8 uH  (value not drawn)
XAL4030-682MEC; 6.8 uH; Isat25C 3.6 A; Irms20C 3.0 A; CAD_CANDIDATE; Manufacturer: Coilcraft; Tolerance: 20%; CAD_Status: CAD_VERIFIED_SOURCE_LAND;NATIVE_INSTANCE_ECO_PENDING; Electrical_Status: PROVISIONAL; CAD_Source: Professor_shared.SchLib glyph Inductor_10uH_4A_7.2*6.6mm; CAD_Limitations: Same-manufacturer series mounting geometry verified; prototype mask/paste choices recorded. Electrical application limits unchanged. Native instance links/ECO pending.; Electrical_Notes: DCRmax25C 74.1 mOhm. Isat es caida30% tipica; falta derating caliente/curva L(I)/perdidas nucleo y CAD. No usar inductor docente sin Isat verificable.; Manufacturer Part Number: XAL4030-682MEC; Value: 6.8 uH; Rating: Isat25C 3.6 A; Irms20C 3.0 A; Power Rating: N/A; Package: XAL4030
footprint GW_XAL4030_COILCRAFT
pins: 1, 2

## GW_XAL4040-103MEC_b36cb917
designator L?, comment 10 uH  (value not drawn)
XAL4040-103MEC; 10 uH; Isat25C 3.0 A; Irms20C 2.2 A; CAD_CANDIDATE; Manufacturer: Coilcraft; Tolerance: 20%; CAD_Status: CAD_VERIFIED_SOURCE_LAND;NATIVE_INSTANCE_ECO_PENDING; Electrical_Status: PROVISIONAL; CAD_Source: Professor_shared.SchLib glyph Inductor_10uH_4A_7.2*6.6mm; CAD_Limitations: Same-manufacturer series mounting geometry verified; prototype mask/paste choices recorded. Electrical application limits unchanged. Native instance links/ECO pending.; Electrical_Notes: DCRmax25C 92.4 mOhm. Isat es caida30% tipica; falta derating caliente/curva L(I)/perdidas nucleo y CAD. No usar inductor docente sin Isat verificable.; Manufacturer Part Number: XAL4040-103MEC; Value: 10 uH; Rating: Isat25C 3.0 A; Irms20C 2.2 A; Power Rating: N/A; Package: XAL4040
footprint GW_XAL4040_COILCRAFT
pins: 1, 2

## HX1188FNL
designator T?
HX1188FNL; CAD_VERIFIED_GEOMETRY; Exact16padpositionsandsourcepin1orientationverified. Manufacturerinchprimaryused;6.86inner/10.16outerspan. Body12.70x9.09mm plusstatedtolerances mustbeconsideredmanually;noverified3D/courtyardorunder-magneticskeepoutclaim. NativeECOpending.; Manufacturer: Pulse Electronics; CAD Status: CAD_VERIFIED_GEOMETRY;NATIVE_ECO_PENDING; Manufacturer Part Number: HX1188FNL; Source: PulseRevB30May2014sheet3PS-2005.002-D;pin1lowerleftTOP,16lands.030x.065inch,pitch.050,rowcentres.335inch; Limitations: Exact16padpositionsandsourcepin1orientationverified. Manufacturerinchprimaryused;6.86inner/10.16outerspan. Body12.70x9.09mm plusstatedtolerances mustbeconsideredmanually;noverified3D/courtyardorunder-magneticskeepoutclaim. NativeECOpending.
footprint GW_HX1188FNL_PULSE
pins: 1 TD+, 2 TCT, 3 TD-, 4 NC, 5 NC, 6 RD+, 7 RCT, 8 RD-, 9 RX-, 10 CMT_RX, 11 RX+, 12 NC, 13 NC, 14 TX-, 15 CMT_TX, 16 TX+

## ISO1212DBQR
designator U?  (value not drawn)
ISO1212DBQR; CAD_VERIFIED_GEOMETRY; Manufacturerimperialprimarylands1.6002x.4064mm matchsavedfoot;metricbracketdimensionsarerounded. Mask+.0508mm,smallroundedcornersareprototypechoices. SUB12/13requireseparatefloating2x2mmislands,notgrounds;nativeimplementationpending.; Manufacturer: Texas Instruments; CAD_Status: CAD_VERIFIED_GEOMETRY;NATIVE_ECO_PENDING; Electrical_Status: PROVISIONAL; CAD_Source: TI SLLSEY7G Table4-2p4 andDBQ0016A4214846/APDF45;16lead,pitch.025inch,row5.4mm,lands.063x.016inch; Manufacturer Part Number: ISO1212DBQR; Value: ISO1212DBQR; CAD_Limitations: Manufacturerimperialprimarylands1.6002x.4064mm matchsavedfoot;metricbracketdimensionsarerounded. Mask+.0508mm,smallroundedcornersareprototypechoices. SUB12/13requireseparatefloating2x2mmislands,notgrounds;nativeimplementationpending.
footprint GW_DBQ0016A_TI
pins: 1 GND1 (power), 2 VCC1 (power), 3 EN (in), 4 OUT1 (out), 5 OUT2 (out), 6 NC, 7 NC, 8 GND1 (power), 9 FGND2 (power), 10 IN2 (in), 11 SENSE2 (in), 12 SUB2, 13 SUB1, 14 FGND1 (power), 15 IN1 (in), 16 SENSE1 (in)

## KC2016Z25.0000C15XXK
designator Y?
KC2016Z25.0000C15XXK; CAD_VERIFIED_GEOMETRY; Exactpin1STANDBY/2GND/3OUT/4VCC,mirrorandlandsverified. Independentoscillatorsretained;totalPCB/inputload<=15pF andPHYphase-noiseperformance remainprototypeclockacceptanceconditions. Noautomaticclocksharing. Body2.0x1.6mm;noverified3D/courtyardclaim.; Manufacturer: Kyocera; CAD Status: CAD_VERIFIED_GEOMETRY;NATIVE_ECO_PENDING; Manufacturer Part Number: KC2016Z25.0000C15XXK; Source: KyoceraTNY1T-H1-DEX01-11pp4/6;bottomviewmirroredtoPCBtop;lands.6x.8atx+/-.9,y+/-.6; Limitations: Exactpin1STANDBY/2GND/3OUT/4VCC,mirrorandlandsverified. Independentoscillatorsretained;totalPCB/inputload<=15pF andPHYphase-noiseperformance remainprototypeclockacceptanceconditions. Noautomaticclocksharing. Body2.0x1.6mm;noverified3D/courtyardclaim.
footprint GW_KC2016Z_KYOCERA
pins: 1 STANDBY (in), 2 GND (power), 3 OUT_25MHz (out), 4 VCC (power)

## LMR36015FBRNXR
designator U?  (value not drawn)
LMR36015FBRNXR; CAD_VERIFIED_GEOMETRY; CAD_VERIFIED_GEOMETRY: confirm delivered RNX revision A/B. NC3 is externally connected to SW per TI. RNX12 is SW, not a ground exposed pad. Two footprint variants retained.; RNX A/B copper/mask/stencil verified2026-11-08. Confirm lot/assembler process. NC3->SW12;12 is not ground. Native placement/ECO pending.; Manufacturer: Texas Instruments; CAD_Status: CAD_VERIFIED_GEOMETRY;NATIVE_ECO_PENDING; Electrical_Status: PROVISIONAL; CAD_Source: SNVSB49D p4; RNX0012A 4222858/A PDF pp44-46 and RNX0012B 4223969/C pp47-49; Manufacturer Part Number: LMR36015FBRNXR; Value: LMR36015FBRNXR; CAD_Limitations: RNX A/B copper/mask/stencil verified2026-11-08. Confirm lot/assembler process. NC3->SW12;12 is not ground. Native placement/ECO pending.
footprint GW_RNX0012A_TI
footprint GW_RNX0012B_TI
pins: 1 PGND (power), 2 VIN (power), 3 NC, 4 BOOT (power), 5 VCC (power), 6 AGND (power), 7 FB (in), 8 PG (oc), 9 EN (in), 10 VIN (power), 11 PGND (power), 12 SW (power)

## MM204F1K00TKRTR3K0
designator R?
MM204F1K00TKRTR3K0; CAD_VERIFIED_GEOMETRY; Saved1.3x1.6landsatx+/-1.45mmmatchmanufacturerreflowtable. Nonpolar1/2projectmappingverified. NormalDIType3applicationonly;no500V/1kVsurgequalificationinferredfromMELFor0.25W. NativeDIresistornetsmustbecorrected.; Manufacturer: Firstohm; CAD Status: CAD_VERIFIED_GEOMETRY;NATIVE_ECO_PENDING; Manufacturer Part Number: MM204F1K00TKRTR3K0; Source: FirstohmMMRev08March2023printedp78/PDF4MM16/MM204REFLOW:L1.3min,W1.6min,innerP1.6+/-.1mm; Limitations: Saved1.3x1.6landsatx+/-1.45mmmatchmanufacturerreflowtable. Nonpolar1/2projectmappingverified. NormalDIType3applicationonly;no500V/1kVsurgequalificationinferredfromMELFor0.25W. NativeDIresistornetsmustbecorrected.
footprint GW_MM204_FIRSTOHM
pins: 1, 2

## MMBT3904-7-F
designator Q?
Diodes DS30036 Rev27-2 March2025 p1 top view/order, p3 electrical, p6 suggested lands; conventional NPN symbol; used in5V BSP input driver,NOT24V load path; Manufacturer: Diodes Incorporated; Manufacturer Part Number: MMBT3904-7-F; Value: NPN 40V200mA; CAD Status: CAD_VERIFIED_GEOMETRY;NATIVE_PLACEMENT_PENDING; Electrical Status: DERIVED_PENDING_REVIEW; Source: Diodes DS30036 Rev27-2 March2025 p1 top view/order, p3 electrical, p6 suggested lands; Datasheet: sources/autonomous_closure/MMBT3904.pdf; Terminal Mapping: Top view tab/lead above C/D; lower-left B/G; lower-right E/S; manufacturer functional IDs, no guessed numbers
footprint GW_MMBT3904_BEC_DIODES
pins: B (in), C, E

## NIS3071MT4TWG
designator U?
Approved prototype,62k current setting,oneCH1,defaultON/auto-retry. EP identity unchanged; explicitDFM groundland2.85x4.58,windowedpaste; original manufacturer pattern retained alternate.; Manufacturer: onsemi; Manufacturer Part Number: NIS3071MT4TWG; CAD Status: CAD_VERIFIED; Electrical Approval: SUPERSEDED_BY_TPS26620DRCR; Electrical Test: NOT_TESTED; Revision Use: HISTORICAL_RESOURCE_ONLY; no Academic Rev1 placement; Source: onsemi NIS3071/D Rev3 Apr2026 table1 p2; CASE510CM 98AON08122H IssueO p12; Datasheet: sources/input_protection/NIS3071-D.PDF; Limitations: Approved prototype,62k current setting,oneCH1,defaultON/auto-retry. EP identity unchanged; explicitDFM groundland2.85x4.58,windowedpaste; original manufacturer pattern retained alternate.; Design Approval: SUPERSEDED_BY_TPS26620DRCR
footprint GW_NIS3071_510CM_ONSEMI
footprint GW_NIS3071_510CM_PROTO
pins: 1 OUT1 (power), 2 IN1 (power), 3 IN2 (power), 4 OUT2 (power), 5 FAULT_N (oc), 6 dvdt, 7 ILIM, 8 GND (power), 9 OUT4 (power), 10 IN4 (power), 11 IN3 (power), 12 OUT3 (power), 13 EN4 (in), 14 EN3 (in), 15 EN2 (in), 16 EN1 (in), EP GND_PAD (power)

## RC0603FR-071ML
designator R?  value 1 MOhm
Resistor thick film 1 Mohm 1% 1/10W 75V 0603, Yageo RC_L; Manufacturer Part Number: RC0603FR-071ML; CAD Status: CAD_VERIFIED_SOURCE_LAND;NATIVE_INSTANCE_ECO_PENDING; Limitations: Same-manufacturer series mounting geometry verified; prototype mask/paste choices recorded. Electrical application limits unchanged. Native instance links/ECO pending.; Manufacturer: Yageo; Source: Yageo RC_L product specification V.11 (2020), Table 2 p5: RC0603 1% 1R-10M, 1/10W, 75V; libraries/sources/passives/Yageo_RC_L_V11_2020.pdf
footprint GW_RC0603_YAGEO_REFLOW
pins: 1, 2

## RC0603FR-074K7L
designator R?
RC0603FR-074K7L;1%0.1W75V0603; manufacturer RCseries ordering;Yageo mounting13Feb2018V10p4; Value: 4.7 kOhm; CAD Status: CAD_VERIFIED_GEOMETRY;NATIVE_PLACEMENT_PENDING; Electrical Status: DERIVED_PENDING_REVIEW;ORDER_CODE_FAMILY_SUPPORTED;EXACT_NOMINAL_SHEET_PENDING; Tolerance: 1%; Voltage Rating: 75V or sqrt(P*R),whichever lower; Power Rating: 0.1W at70C; Manufacturer: Yageo; Manufacturer Part Number: RC0603FR-074K7L; Source: Yageo RC0603 series order coding; Mounting13Feb2018V10 p4 Fig4/Table1; Package: 0603
footprint GW_RC0603_YAGEO_REFLOW
pins: 1, 2

## RC0603FR-0710KL
designator R?
Existing exact Yageo RC0603FR-0710KL sheet p1; AN5419 boot example; TI SLLSF78B section10.1; 10kOhm1%0.1W@70C; replaces unqualified FOJAN identity. Shared professor lands remain CAD_CANDIDATE, not qualified manufacturer lands.; CAD Status: CAD_VERIFIED_SOURCE_LAND;NATIVE_INSTANCE_ECO_PENDING; Limitations: Same-manufacturer series mounting geometry verified; prototype mask/paste choices recorded. Electrical application limits unchanged. Native instance links/ECO pending.; Manufacturer: Yageo; Manufacturer Part Number: RC0603FR-0710KL; Source: Existing exact Yageo RC0603FR-0710KL sheet p1; AN5419 boot example; TI SLLSF78B section10.1
footprint GW_RC0603_YAGEO_REFLOW
pins: 1, 2

## RC0603FR-0713K3L
designator R?
13.3kOhm1%0.1W75V; Exact Yageo spec; manufacturer Mounting2018p4Fig4/Table1; Manufacturer Part Number: RC0603FR-0713K3L; Design Approval: PROPOSED_APPLICATION_VALUE; CAD Status: CAD_VERIFIED; Electrical Test: NOT_TESTED; Manufacturer: Yageo; Value: 13.3kOhm1%0.1W75V; Source: Exact Yageo spec; manufacturer Mounting2018p4Fig4/Table1; Datasheet: https://yageogroup.com/download/specsheet/RC0603FR-0713K3L
footprint GW_RC0603_YAGEO_REFLOW
pins: 1, 2

## RC0603FR-0715KL
designator R?
Yageo Mounting13-Feb-2018 V10 p4 Fig4/Table1; exact62k/15k manufacturer spec sheets; 15.0kOhm1%0.1W75V;; Manufacturer Part Number: RC0603FR-0715KL; Design Approval: PROTOTYPE_APPROVED; Electrical Test: NOT_TESTED; CAD Status: CAD_VERIFIED; Limitations: None; Manufacturer: Yageo; Value: 15.0kOhm1%0.1W75V; Source: Yageo Mounting13-Feb-2018 V10 p4 Fig4/Table1; exact62k/15k manufacturer spec sheets
footprint GW_RC0603_YAGEO_REFLOW
pins: 1, 2

## RC0603FR-0730K1L
designator R?
30.1kOhm1%0.1W75V; Exact Yageo spec; manufacturer Mounting2018p4Fig4/Table1; Manufacturer Part Number: RC0603FR-0730K1L; Design Approval: PROPOSED_APPLICATION_VALUE; CAD Status: CAD_VERIFIED; Electrical Test: NOT_TESTED; Manufacturer: Yageo; Value: 30.1kOhm1%0.1W75V; Source: Exact Yageo spec; manufacturer Mounting2018p4Fig4/Table1; Datasheet: https://yageogroup.com/download/specsheet/RC0603FR-0730K1L
footprint GW_RC0603_YAGEO_REFLOW
pins: 1, 2